# Altium footprint library HFPB_01-PCBLib.PcbLib: 102 footprints (part 5 of 7)
Each footprint in its own frame and in the unit in brackets; x right, y up, seen from the top. Pads: shape width x height; smd on the part's side, far side on the other; paste and mask are expansions set on the pad; w line width, h text height; cw(c..) or ccw(c..) is an arc to the next point about the centre after c.
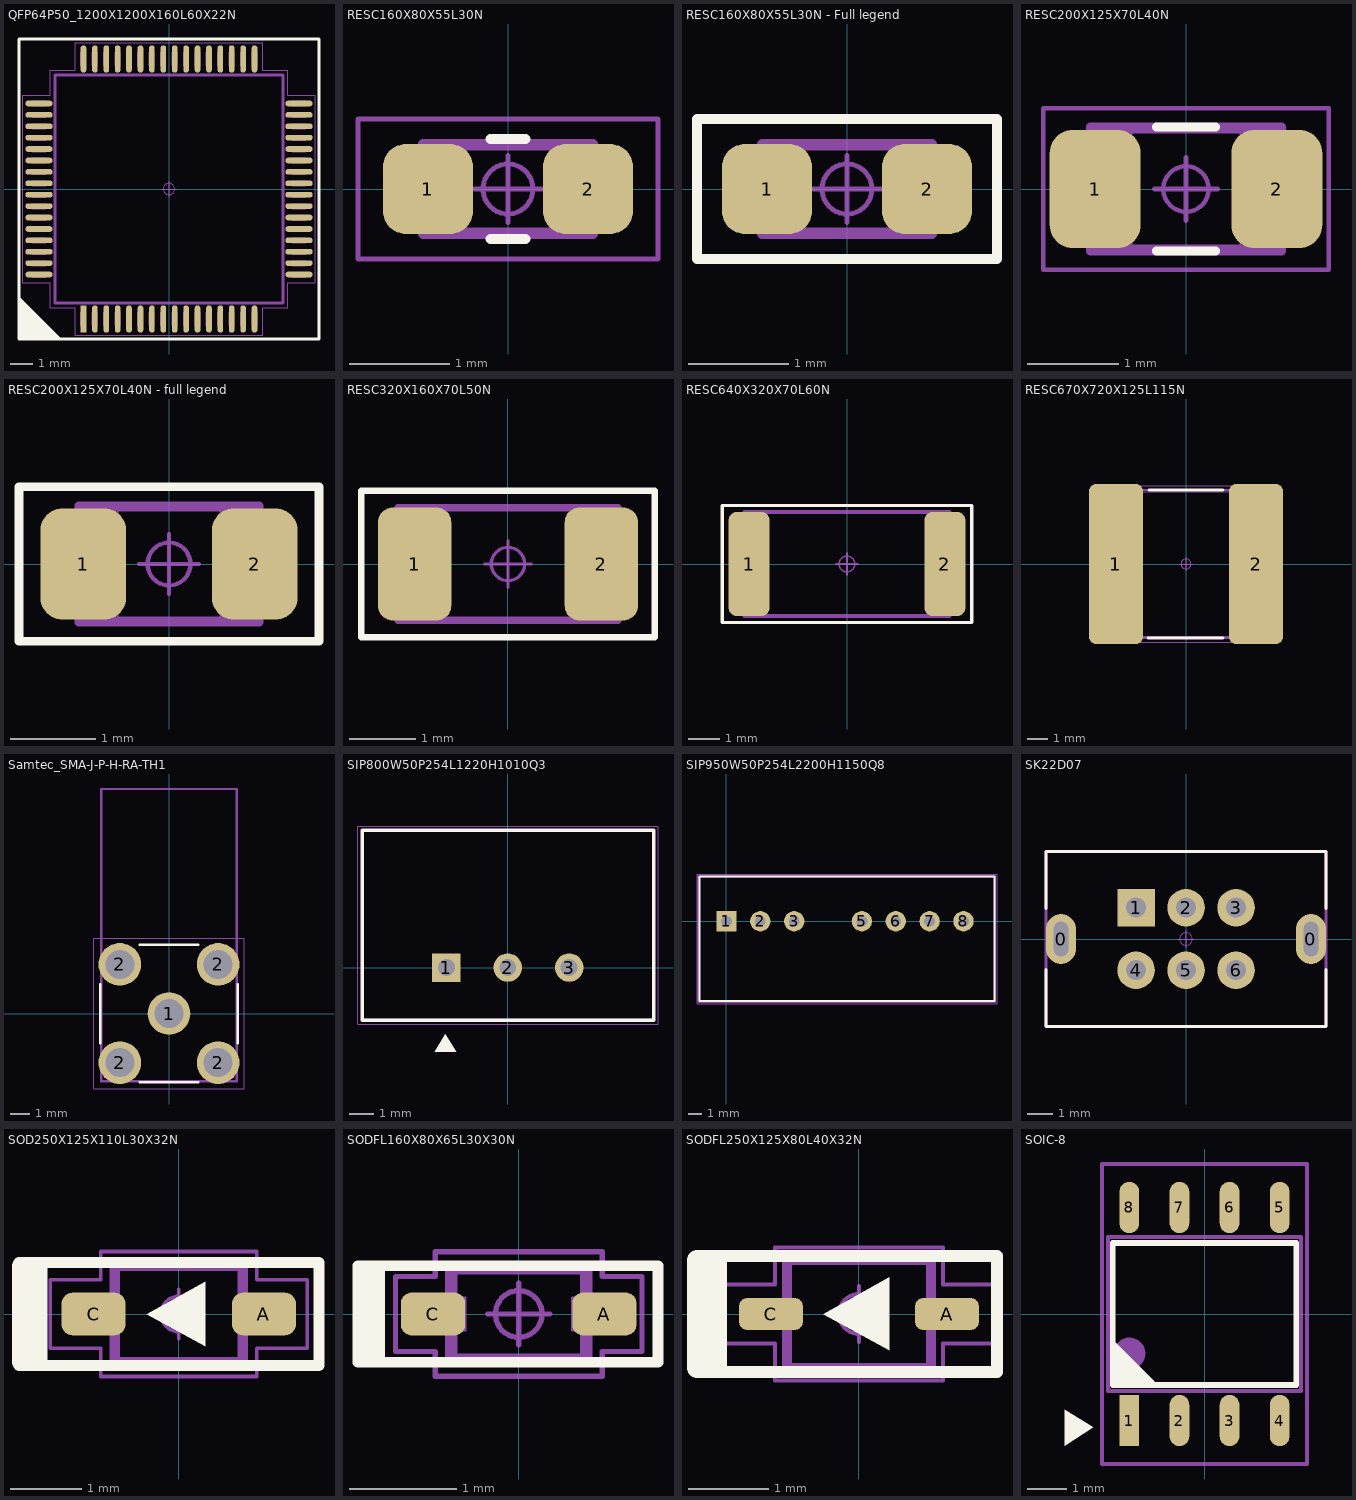
[diagram p4: the footprints below, top view; thin cyan lines are the x and y axes]

## QFP64P50_1200X1200X160L60X22N [mm] "Quad Flat Pack (QFP), 0.50 mm pitch; square, 16 pin X 16 pin, 10.00 mm L X 10.00 mm W X 1.60 mm H body"
height 1.6
pads (64):
  rect 0.25x1.2 smd: 1(-3.75,-5.7)
  oval 0.25x1.2 smd: 2(-3.25,-5.7) 3(-2.75,-5.7) 4(-2.25,-5.7) 5(-1.75,-5.7) 6(-1.25,-5.7) 7(-0.75,-5.7) 8(-0.25,-5.7) 9(0.25,-5.7) 10(0.75,-5.7) 11(1.25,-5.7) 12(1.75,-5.7) 13(2.25,-5.7) 14(2.75,-5.7) 15(3.25,-5.7) 16(3.75,-5.7) 33(3.75,5.7) 34(3.25,5.7) 35(2.75,5.7) 36(2.25,5.7) 37(1.75,5.7) 38(1.25,5.7) 39(0.75,5.7) 40(0.25,5.7) 41(-0.25,5.7) 42(-0.75,5.7) 43(-1.25,5.7) 44(-1.75,5.7) 45(-2.25,5.7) 46(-2.75,5.7) 47(-3.25,5.7) 48(-3.75,5.7)
  oval 1.2x0.25 smd: 17(5.7,-3.75) 18(5.7,-3.25) 19(5.7,-2.75) 20(5.7,-2.25) 21(5.7,-1.75) 22(5.7,-1.25) 23(5.7,-0.75) 24(5.7,-0.25) 25(5.7,0.25) 26(5.7,0.75) 27(5.7,1.25) 28(5.7,1.75) 29(5.7,2.25) 30(5.7,2.75) 31(5.7,3.25) 32(5.7,3.75) 49(-5.7,3.75) 50(-5.7,3.25) 51(-5.7,2.75) 52(-5.7,2.25) 53(-5.7,1.75) 54(-5.7,1.25) 55(-5.7,0.75) 56(-5.7,0.25) 57(-5.7,-0.25) 58(-5.7,-0.75) 59(-5.7,-1.25) 60(-5.7,-1.75) 61(-5.7,-2.25) 62(-5.7,-2.75) 63(-5.7,-3.25) 64(-5.7,-3.75)
Top Overlay:
  region: -6.575,-4.725 -6.575,-6.575 -4.725,-6.575
  lines w0.15: -6.575,-6.575 -6.575,6.575 6.575,6.575 6.575,-6.575 -6.575,-6.575
Mechanical 11:
  lines w0.12: -5,-5 -5,5 5,5 5,-5 -5,-5
Mechanical 12:
  drawing of 260 lines, arcs and shapes, not listed
Mechanical 15:
  circle w0.05: c0,0 r0.25
  lines w0.05: -0.35,0 0.35,0 ; 0,-0.35 0,0.35 ; -6.405,-4.1 -6.405,4.1 -5.2,4.1 -5.2,5.2 -4.1,5.2 -4.1,6.405 4.1,6.405 4.1,5.2 5.2,5.2 5.2,4.1 6.405,4.1 6.405,-4.1 5.2,-4.1 5.2,-5.2 4.1,-5.2 4.1,-6.405 -4.1,-6.405 -4.1,-5.2 -5.2,-5.2 -5.2,-4.1 -6.405,-4.1
Mechanical 16:
  text ".Designator" at 0,0 h1.2
3D body "QFP64P50_1200X1200X160L60X22.STEP": height 1.6, standoff 0, extent -6,-6 6,6

## RESC160X80X55L30N [mm] "Resistor, Chip; 1.60 mm L X 0.80 mm W X 0.55 mm H body"
height 0.55
pads (2):
  rrect51% 0.9x0.9 smd: 1(-0.8,0) 2(0.8,0)
Top Overlay:
  lines w0.1: -0.175,-0.5 0.175,-0.5 ; -0.175,0.5 0.175,0.5
Mechanical 11:
  lines w0.1: -0.85,-0.45 0.85,-0.45 0.85,0.45 -0.85,0.45 -0.85,-0.45
Mechanical 12:
  lines w0.025: -0.8,-0.4 0.8,-0.4 ; -0.8,-0.4 -0.8,0.4 ; -0.8,-0.4 -0.8,0.4 ; -0.8,-0.4 -0.5,-0.4 -0.5,0.4 -0.8,0.4 ; -0.8,0.4 0.8,0.4 ; 0.8,-0.4 0.8,0.4 ; 0.8,-0.4 0.5,-0.4 0.5,0.4 0.8,0.4 ; 0.8,-0.4 0.8,0.4
Mechanical 15:
  circle w0.05: c0,0 r0.25
  lines w0.05: -0.335,0 0.335,0 ; 0,-0.335 0,0.335 ; -1.5,-0.7 1.5,-0.7 1.5,0.7 -1.5,0.7 -1.5,-0.7
Mechanical 16:
  text ".Designator" at -1.525,0.85 h1.2
3D body "RESC160X80X55L30.STEP": height 0.55, standoff 0, extent -0.8,-0.4 0.8,0.4

## RESC160X80X55L30N - Full legend [mm] "Resistor, Chip; 1.60 mm L X 0.80 mm W X 0.55 mm H body"
height 0.55
pads (2):
  rrect51% 0.9x0.9 smd: 1(-0.8,0) 2(0.8,0)
Top Overlay:
  lines w0.1: -1.5,-0.7 1.5,-0.7 1.5,0.7 -1.5,0.7 -1.5,-0.7
Mechanical 11:
  lines w0.1: -0.85,-0.45 -0.85,0.45 0.85,0.45 0.85,-0.45 -0.85,-0.45
Mechanical 12:
  lines w0.025: -0.8,-0.4 -0.5,-0.4 -0.5,0.4 -0.8,0.4 ; -0.8,-0.4 -0.8,0.4 ; -0.8,-0.4 -0.8,0.4 ; -0.8,-0.4 0.8,-0.4 ; -0.8,0.4 0.8,0.4 ; 0.8,-0.4 0.8,0.4 ; 0.8,-0.4 0.5,-0.4 0.5,0.4 0.8,0.4 ; 0.8,-0.4 0.8,0.4
Mechanical 15:
  circle w0.05: c0,0 r0.25
  lines w0.05: -0.335,0 0.335,0 ; 0,-0.335 0,0.335 ; -1.5,-0.7 -1.5,0.7 ; -1.5,-0.7 -1.5,0.7 ; -1.5,-0.7 1.5,-0.7 1.5,0.7 ; -1.5,0.7 1.5,0.7 ; -1.5,0.7 1.5,0.7
Mechanical 16:
  text ".Designator" at -1.5,0.85 h1.2
3D body "RESC160X80X55L30.STEP": height 0.55, standoff 0, extent -0.8,-0.4 0.8,0.4

## RESC200X125X70L40N [mm] "Resistor, Chip; 2.00 mm L X 1.25 mm W X 0.70 mm H body"
height 0.7
pads (2):
  rrect51% 1x1.3 smd: 1(-1,0) 2(1,0)
Top Overlay:
  lines w0.1: -0.325,-0.68 0.325,-0.68 ; -0.325,0.68 0.325,0.68
Mechanical 11:
  lines w0.1: -1.05,-0.68 -1.05,0.68 1.05,0.68 1.05,-0.68 -1.05,-0.68
Mechanical 12:
  lines w0.025: -1,-0.625 -0.6,-0.625 -0.6,0.625 -1,0.625 ; -1,-0.625 -1,0.625 ; -1,-0.625 -1,0.625 ; -1,-0.625 1,-0.625 ; -1,0.625 1,0.625 ; 1,-0.625 1,0.625 ; 1,-0.625 0.6,-0.625 0.6,0.625 1,0.625 ; 1,-0.625 1,0.625
Mechanical 15:
  circle w0.05: c0,0 r0.25
  lines w0.05: -0.35,0 0.35,0 ; 0,-0.35 0,0.35 ; -1.57,-0.89 -1.57,0.89 1.57,0.89 1.57,-0.89 -1.57,-0.89
Mechanical 16:
  text ".Designator" at 0,0 h1.2
3D body "RESC200X125X70L40.STEP": height 0.7, standoff 0, extent -1,-0.625 1,0.625

## RESC200X125X70L40N - full legend [mm] "Resistor, Chip; 2.00 mm L X 1.25 mm W X 0.70 mm H body"
height 0.7
pads (2):
  rrect51% 1x1.3 smd: 1(-1,0) 2(1,0)
Top Overlay:
  lines w0.1: -1.75,-0.9 1.75,-0.9 1.75,0.9 -1.75,0.9 -1.75,-0.9
Mechanical 11:
  lines w0.1: -1.05,-0.68 -1.05,0.68 1.05,0.68 1.05,-0.68 -1.05,-0.68
Mechanical 12:
  lines w0.025: -1,-0.625 -0.6,-0.625 -0.6,0.625 -1,0.625 ; -1,-0.625 -1,0.625 ; -1,-0.625 -1,0.625 ; -1,-0.625 1,-0.625 ; -1,0.625 1,0.625 ; 1,-0.625 1,0.625 ; 1,-0.625 0.6,-0.625 0.6,0.625 1,0.625 ; 1,-0.625 1,0.625
Mechanical 15:
  circle w0.05: c0,0 r0.25
  lines w0.05: -0.35,0 0.35,0 ; 0,-0.35 0,0.35 ; -1.75,-0.9 -1.75,0.9 1.75,0.9 1.75,-0.9 -1.75,-0.9
Mechanical 16:
  text ".Designator" at 0,0 h1.2
3D body "RESC200X125X70L40.STEP": height 0.7, standoff 0, extent -1,-0.625 1,0.625

## RESC320X160X70L50N [mm] "Resistor, Chip; 3.20 mm L X 1.60 mm W X 0.70 mm H body"
height 0.7
pads (2):
  rrect40% 1.1x1.7 smd: 1(-1.4,0) 2(1.4,0)
Top Overlay:
  lines w0.1: -2.2,-1.1 -2.2,1.1 2.2,1.1 2.2,-1.1 -2.2,-1.1
Mechanical 11:
  lines w0.1: -1.65,-0.85 1.65,-0.85 1.65,0.85 -1.65,0.85 -1.65,-0.85
Mechanical 12:
  lines w0.025: -1.6,-0.8 1.6,-0.8 ; -1.6,-0.8 -1.6,0.8 ; -1.6,-0.8 -1.6,0.8 ; -1.6,-0.8 -1.1,-0.8 -1.1,0.8 -1.6,0.8 ; -1.6,0.8 1.6,0.8 ; 1.6,-0.8 1.6,0.8 ; 1.6,-0.8 1.1,-0.8 1.1,0.8 1.6,0.8 ; 1.6,-0.8 1.6,0.8
Mechanical 15:
  circle w0.05: c0,0 r0.25
  lines w0.05: -0.35,0 0.35,0 ; 0,-0.35 0,0.35 ; -2.2,-1.1 2.2,-1.1 2.2,1.1 -2.2,1.1 -2.2,-1.1
Mechanical 16:
  text ".Designator" at 0,0 h1.2
3D body "RESC320X160X70L50.STEP": height 0.7, standoff 0, extent -1.6,-0.8 1.6,0.8

## RESC640X320X70L60N [mm] "Resistor, Chip; 6.40 mm L X 3.20 mm W X 0.70 mm H body"
height 0.7
pads (2):
  rrect40% 1.3x3.3 smd: 1(-3.1,0) 2(3.1,0)
Top Overlay:
  lines w0.1: -3.95,-1.85 -3.95,1.85 3.95,1.85 3.95,-1.85 -3.95,-1.85
Mechanical 11:
  lines w0.12: -3.25,-1.65 3.25,-1.65 3.25,1.65 -3.25,1.65 -3.25,-1.65
Mechanical 12:
  lines w0.025: -3.2,-1.6 3.2,-1.6 ; -3.2,-1.6 -3.2,1.6 ; -3.2,-1.6 -3.2,1.6 ; -3.2,-1.6 -2.6,-1.6 -2.6,1.6 -3.2,1.6 ; -3.2,1.6 3.2,1.6 ; 3.2,-1.6 3.2,1.6 ; 3.2,-1.6 2.6,-1.6 2.6,1.6 3.2,1.6 ; 3.2,-1.6 3.2,1.6
Mechanical 15:
  circle w0.05: c0,0 r0.25
  lines w0.05: -0.35,0 0.35,0 ; 0,-0.35 0,0.35 ; -3.95,-1.85 3.95,-1.85 3.95,1.85 -3.95,1.85 -3.95,-1.85
Mechanical 16:
  text ".Designator" at 0,0 h1.2
3D body "RESC640X320X70L60.STEP": height 0.7, standoff 0, extent -3.2,-1.6 3.2,1.6

## RESC670X720X125L115N [mm] "Resistor, Chip; 6.70 mm L X 7.20 mm W X 1.25 mm H body"
height 1.25
pads (2):
  rrect26% 2.7x8 smd: 1(-3.5,0) 2(3.5,0)
Top Overlay:
  lines w0.15: -1.9,-3.7 1.85,-3.7 ; -1.85,3.7 1.85,3.7
Mechanical 11:
  lines w0.12: -3.45,-3.7 3.45,-3.7 3.45,3.7 -3.45,3.7 -3.45,-3.7
Mechanical 12:
  lines w0.025: -3.35,-3.6 3.35,-3.6 ; -3.35,-3.6 -3.35,3.6 ; -3.35,-3.6 -3.35,3.6 ; -3.35,-3.6 -2.2,-3.6 -2.2,3.6 -3.35,3.6 ; -3.35,3.6 3.35,3.6 ; 3.35,-3.6 3.35,3.6 ; 3.35,-3.6 2.2,-3.6 2.2,3.6 3.35,3.6 ; 3.35,-3.6 3.35,3.6
Mechanical 15:
  circle w0.05: c0,0 r0.25
  lines w0.05: -0.35,0 0.35,0 ; 0,-0.35 0,0.35 ; -4.16,-3.91 4.16,-3.91 4.16,3.91 -4.16,3.91 -4.16,-3.91
Mechanical 16:
  text ".Designator" at 0,0 h1.2
3D body "RESC670X720X125L115.STEP": height 1.25, standoff 0, extent -3.35,-3.6 3.35,3.6

## Samtec_SMA-J-P-H-RA-TH1 [mm]
pads (5):
  round 2.2 / inner round 2.2 / far side round 2.4 hole 1.5: 1(0,0) 2(-2.54,-2.54) 2(-2.54,2.54) 2(2.54,-2.54) 2(2.54,2.54)
Top Overlay:
  lines w0.127: -3.55,-1.525 -3.55,1.525 ; -1.525,-3.55 1.525,-3.55 ; -1.525,3.55 1.525,3.55 ; 3.55,-1.525 3.55,1.525
Mechanical 13:
  lines w0.127: -3.5,-3.5 3.5,-3.5 3.5,11.6 -3.5,11.6 -3.5,-3.5
Mechanical 15:
  lines w0.05: -3.9,-3.9 3.9,-3.9 3.9,3.9 -3.9,3.9 -3.9,-3.9
3D body "SMA-J-P-H-RA-TH1.stp": height 10, standoff -3.8, extent -3.5,-3.5 3.5,11.6

## SIP800W50P254L1220H1010Q3 [mm] "SIP, 2.54 mm pitch; 3 pin, 12.20 mm L X 8.00 mm W X 10.10 mm H body"
height 10.1
pads (3):
  rect 1.18x1.18 / inner round 1.18 / far side rect 1.18x1.18 hole 0.7 paste-1.18: 1(-2.54,0)
  round 1.18 hole 0.7 paste-1.18: 2(0,0) 3(2.54,0)
Top Overlay:
  region: -3.026,-3.488 -2.119,-3.488 -2.591,-2.762
  lines w0.15: -6.015,-2.175 6.035,-2.175 6.035,5.675 -6.015,5.675 -6.015,-2.175
Mechanical 11:
  lines w0.12: -6.015,-2.175 -6.015,5.675 6.035,5.675 6.035,-2.175 -6.015,-2.175
Mechanical 12:
  lines w0.025: -6.015,-2.175 -6.015,5.675 6.035,5.675 6.035,-2.175 -6.015,-2.175 ; -2.815,-0.15 -2.265,-0.15 -2.265,0.15 -2.815,0.15 -2.815,-0.15 ; -0.275,-0.15 0.275,-0.15 0.275,0.15 -0.275,0.15 -0.275,-0.15 ; 2.265,-0.15 2.815,-0.15 2.815,0.15 2.265,0.15 2.265,-0.15
Mechanical 15:
  circle w0.05: c-2.54,0 r0.25
  lines w0.05: -2.89,0 -2.19,0 ; -2.54,-0.35 -2.54,0.35 ; -6.19,-2.35 -6.19,5.85 6.21,5.85 6.21,-2.35 -6.19,-2.35
Mechanical 16:
  text ".Designator" at -2.54,0 h1.2
3D body "tsr1_3d_drawing.stp": height 10.15, standoff -4.05, extent -5.84,-2 5.86,5.5

## SIP950W50P254L2200H1150Q8 [mm] "SIP, 2.54 mm pitch; 8 pin, 22.00 mm L X 9.50 mm W X 11.50 mm H body"
height 11.5
pads (7):
  rect 1.5x1.5 hole 0.8 paste-1.2: 1(0,0)
  round 1.5 hole 0.8 paste-1.2: 2(2.5,0) 3(5,0) 5(10,0) 6(12.5,0) 7(15,0) 8(17.5,0)
Top Overlay:
  lines w0.15: -2,-5.9 -2,3.3 19.8,3.3 19.8,-5.9 -2,-5.9
Mechanical 11:
  lines w0.12: -2,-5.9 19.8,-5.9 19.8,3.3 -2,3.3 -2,-5.9
Mechanical 12:
  lines w0.025: -2.075,-5.975 19.89,-5.975 19.89,3.375 -2.075,3.375 -2.075,-5.975 ; -0.275,-0.175 -0.275,0.175 0.275,0.175 0.275,-0.175 -0.275,-0.175 ; 2.265,-0.175 2.265,0.175 2.815,0.175 2.815,-0.175 2.265,-0.175 ; 4.725,-0.175 4.725,0.175 5.275,0.175 5.275,-0.175 4.725,-0.175 ; 9.735,-0.175 9.735,0.175 10.285,0.175 10.285,-0.175 9.735,-0.175 ; 12.225,-0.175 12.225,0.175 12.775,0.175 12.775,-0.175 12.225,-0.175 ; 14.715,-0.175 14.715,0.175 15.265,0.175 15.265,-0.175 14.715,-0.175 ; 17.225,-0.175 17.225,0.175 17.775,0.175 17.775,-0.175 17.225,-0.175
Mechanical 15:
  circle w0.05: c0,0 r0.25
  lines w0.05: -0.35,0 0.35,0 ; 0,-0.35 0,0.35 ; -2.175,-6.075 19.975,-6.075 19.975,3.45 -2.175,3.45 -2.175,-6.075
Mechanical 16:
  text ".Designator" at 0,0 h1.2
3D body "EC3SA.STEP": height 11.25, standoff -4.05, extent -2,-5.9 19.8,3.3

## SK22D07 [mm]
pads (8):
  oval 1.2x2 hole 0.6 slot 1.4 at 90 deg: 0(-5,0) 0(5,0)
  rect 1.5x1.5 hole 0.8: 1(-2,1.25)
  round 1.5 hole 0.8: 2(0,1.25) 3(2,1.25) 4(-2,-1.25) 5(0,-1.25) 6(2,-1.25)
Top Overlay:
  lines w0.127: -5.6,-1.225 -5.6,-3.5 5.6,-3.5 5.6,-1.225 ; -5.6,1.225 -5.6,3.5 5.6,3.5 5.6,1.225
Mechanical 11:
  lines w0.127: -5.6,-3.5 5.6,-3.5 5.6,3.5 -5.6,3.5 -5.6,-3.5
Mechanical 15:
  circle w0.05: c0,0 r0.25
  lines w0.05: -0.35,0 0.35,0 ; 0,-0.35 0,0.35 ; -5.6,-3.5 5.6,-3.5 5.6,3.5 -5.6,3.5 -5.6,-3.5
Mechanical 16:
  text ".Designator" at 2.8,3.1 h1.2
3D body "EG2208A+.stp": height 5.07, standoff -2.93, extent -5.15,-9.025 5.15,2.975

## SOD250X125X110L30X32N [mm] "Diode, Small Outline Diode (SOD); 1.70 mm L X 1.25 mm W X 1.10 mm H body"
height 1.1
pads (2):
  rrect50% 0.9x0.6 smd: A(1.2,0) C(-1.2,0)
Top Overlay:
  region: -0.45,0 0.375,0.458 0.375,-0.455
  lines w0.15: -2.25,-0.725 1.975,-0.725 1.975,0.725 -2.25,0.725
  lines w0.25: -2.225,-0.675 -2.225,0.675 ; -1.975,-0.675 -1.975,0.675
Mechanical 11:
  lines w0.15: -0.9,-0.68 0.9,-0.68 0.9,0.68 -0.9,0.68 -0.9,-0.68
Mechanical 12:
  lines w0.025: -1.25,-0.162 -1.25,0.162 -0.95,0.162 -0.95,-0.162 -1.25,-0.162 ; -0.85,-0.625 0.85,-0.625 0.85,0.625 -0.85,0.625 -0.85,-0.625 ; 0.95,-0.162 1.25,-0.162 1.25,0.162 0.95,0.162 0.95,-0.162
Mechanical 15:
  circle w0.05: c0,0 r0.25
  lines w0.05: -0.35,0 0.35,0 ; 0,-0.35 0,0.35 ; -1.81,-0.48 -1.1,-0.48 -1.1,-0.88 1.1,-0.88 1.1,-0.48 1.81,-0.48 1.81,0.48 1.1,0.48 1.1,0.88 -1.1,0.88 -1.1,0.48 -1.81,0.48 -1.81,-0.48
Mechanical 16:
  text ".Designator" at 0,0 h1.2
3D body "SOD250X125X110L30X32.STEP": height 1.1, standoff 0, extent -1.25,-0.625 1.25,0.625

## SODFL160X80X65L30X30N [mm] "Diode, Small Outline Diode Flat Lead (SODFL); 1.20 mm L X 0.80 mm W X 0.65 mm H body"
height 0.65
pads (2):
  rrect50% 0.6x0.4 smd: A(0.8,0) C(-0.8,0)
Top Overlay:
  lines w0.1: -1.4,-0.45 -1.4,0.45 ; -1.3,-0.45 -1.3,0.45 ; -1.5,-0.45 -1.5,0.45 1.3,0.45 1.3,-0.45 -1.5,-0.45
Mechanical 11:
  lines w0.12: -0.63,-0.43 -0.63,0.43 0.63,0.43 0.63,-0.43 -0.63,-0.43
Mechanical 12:
  lines w0.025: -0.8,-0.15 -0.5,-0.15 -0.5,0.15 -0.8,0.15 -0.8,-0.15 ; -0.6,-0.4 -0.6,0.4 0.6,0.4 0.6,-0.4 -0.6,-0.4 ; 0.5,-0.15 0.5,0.15 0.8,0.15 0.8,-0.15 0.5,-0.15
Mechanical 15:
  circle w0.05: c0,0 r0.218
  lines w0.05: -0.29,0 0.29,0 ; 0,-0.29 0,0.29 ; -1.15,-0.35 -1.15,0.35 -0.78,0.35 -0.78,0.58 0.78,0.58 0.78,0.35 1.15,0.35 1.15,-0.35 0.78,-0.35 0.78,-0.58 -0.78,-0.58 -0.78,-0.35 -1.15,-0.35
Mechanical 16:
  text ".Designator" at 0,0 h1.2
3D body "SODFL160X80X65L30X30.STEP": height 0.65, standoff 0, extent -0.8,-0.4 0.8,0.4

## SODFL250X125X80L40X32N [mm] "Diode, Small Outline Diode Flat Lead (SODFL); 1.70 mm L X 1.25 mm W X 0.80 mm H body"
height 0.8
pads (2):
  rrect50% 0.8x0.4 smd: A(1.1,0) C(-1.1,0)
Top Overlay:
  region: -0.45,0 0.375,0.458 0.375,-0.455
  lines w0.15: -2.025,-0.725 1.725,-0.725 1.725,0.725 -2.025,0.725
  lines w0.25: -2.025,-0.675 -2.025,0.675 ; -1.775,-0.675 -1.775,0.675
Mechanical 11:
  lines w0.12: -0.9,-0.68 0.9,-0.68 0.9,0.68 -0.9,0.68 -0.9,-0.68
Mechanical 12:
  lines w0.025: -1.25,-0.162 -1.25,0.162 -0.85,0.162 -0.85,-0.162 -1.25,-0.162 ; -0.85,-0.625 0.85,-0.625 0.85,0.625 -0.85,0.625 -0.85,-0.625 ; 0.85,-0.162 1.25,-0.162 1.25,0.162 0.85,0.162 0.85,-0.162
Mechanical 15:
  circle w0.05: c0,0 r0.25
  lines w0.05: -0.35,0 0.35,0 ; 0,-0.35 0,0.35 ; -1.71,-0.37 -1.05,-0.37 -1.05,-0.83 1.05,-0.83 1.05,-0.37 1.71,-0.37 1.71,0.37 1.05,0.37 1.05,0.83 -1.05,0.83 -1.05,0.37 -1.71,0.37 -1.71,-0.37
Mechanical 16:
  text ".Designator" at 0,0 h1.2
3D body "SODFL250X125X80L40X32.STEP": height 0.8, standoff 0, extent -1.25,-0.625 1.25,0.625

## SOIC-8 [mm] "SOIC pitch=1.27mm, L*W=4.9mm*3.9mm"
height 1.75
pads (8):
  rect 0.5x1.3 smd: 1(-1.905,-2.7)
  oval 0.5x1.3 smd: 2(-0.635,-2.7) 3(0.635,-2.7) 4(1.905,-2.7) 5(1.905,2.7) 6(0.635,2.7) 7(-0.635,2.7) 8(-1.905,2.7)
Top Overlay:
  region: -2.325,-1.8 -1.175,-1.8 -2.325,-0.65
  region: -3.538,-2.429 -3.538,-3.336 -2.812,-2.864
  lines w0.15: -2.325,-1.8 2.325,-1.8 2.325,1.8 -2.325,1.8 -2.325,-1.8
Mechanical 13:
  circle w0.4: c-1.9,-1 r0.2
  lines w0.1: -2.45,-1.95 2.45,-1.95 2.45,1.95 -2.45,1.95 -2.45,-1.95
Mechanical 15:
  lines w0.1: -2.6,-3.8 2.6,-3.8 2.6,3.8 -2.6,3.8 -2.6,-3.8
3D body "sop127p-6mm-8 v2.step": height 1.65, standoff 0, extent -2.45,-2.95 2.45,2.95